# Altium footprint library Localisation_Node.PcbLib: 36 footprints (part 2 of 3)
Each footprint in its own frame and in the unit in brackets; x right, y up, seen from the top. Pads: shape width x height; smd on the part's side, far side on the other; paste and mask are expansions set on the pad; w line width, h text height; cw(c..) or ccw(c..) is an arc to the next point about the centre after c.
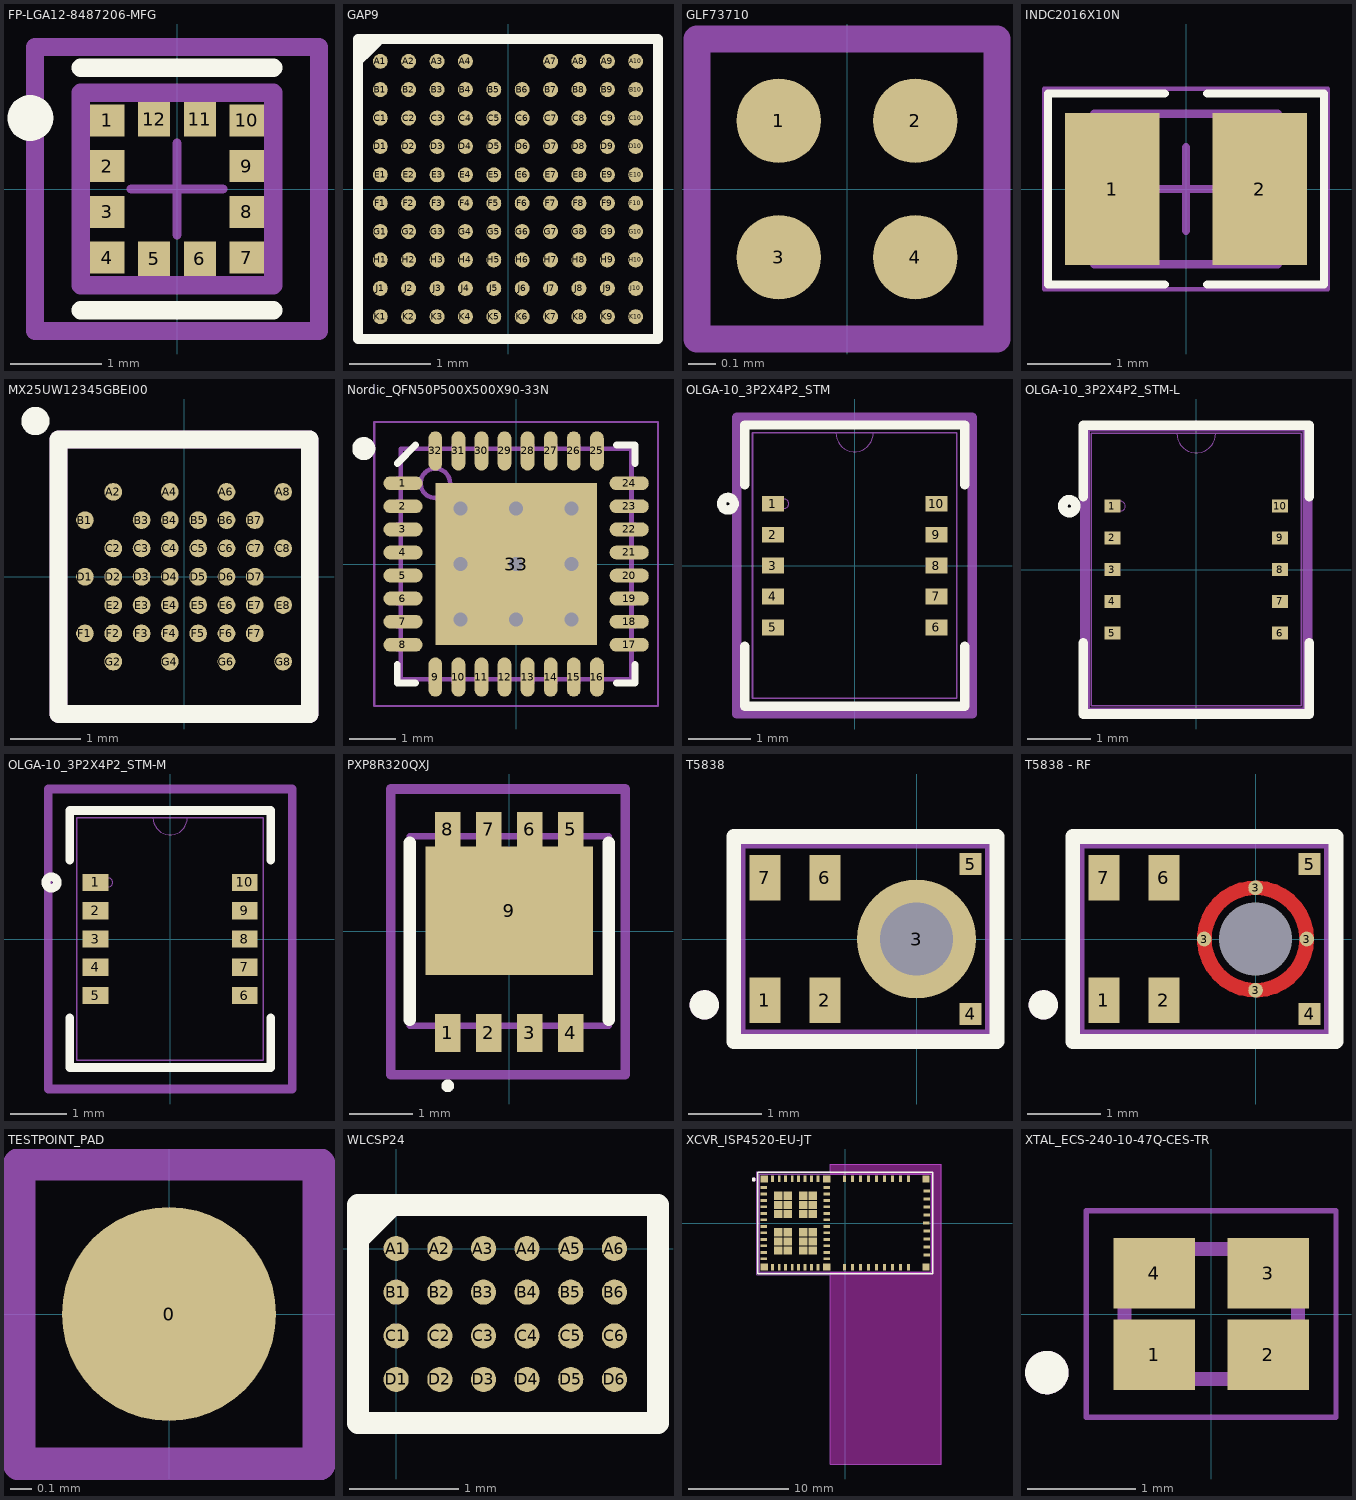
[diagram p1: the footprints below, top view; thin cyan lines are the x and y axes]

## FP-LGA12-8487206-MFG [mm]
pads (12):
  rect 0.375x0.35 smd paste-1000 mask+0: 1(-0.763,0.75) 2(-0.763,0.25) 3(-0.763,-0.25) 4(-0.763,-0.75) 7(0.763,-0.75) 8(0.763,-0.25) 9(0.763,0.25) 10(0.763,0.75)
  rect 0.35x0.375 smd paste-1000 mask+0: 5(-0.25,-0.763) 6(0.25,-0.763) 11(0.25,0.763) 12(-0.25,0.763)
Top Overlay:
  circle w0.25: c-1.6,0.775 r0.125
  lines w0.2: -1.05,-1.325 1.05,-1.325 ; -1.05,1.325 1.05,1.325
Top Paste:
  rectangle: -0.93,0.593 -0.595,0.907
  rectangle: -0.93,0.093 -0.595,0.406
  rectangle: -0.93,-0.406 -0.595,-0.093
  rectangle: -0.93,-0.907 -0.595,-0.593
  rectangle: 0.595,-0.907 0.93,-0.593
  rectangle: 0.595,-0.406 0.93,-0.093
  rectangle: 0.595,0.093 0.93,0.406
  rectangle: 0.595,0.593 0.93,0.907
  rectangle: -0.406,-0.93 -0.093,-0.595
  rectangle: 0.093,-0.93 0.406,-0.595
  rectangle: 0.093,0.595 0.406,0.93
  rectangle: -0.406,0.595 -0.093,0.93
Top 3D Body:
  lines w0.2: -1.05,-1.05 1.05,-1.05 1.05,1.05 -1.05,1.05 -1.05,-1.05
Top Courtyard:
  lines w0.2: -1.55,-1.55 1.55,-1.55 1.55,1.55 -1.55,1.55 -1.55,-1.55
Top Assembly:
  lines w0.2: -1.55,-1.55 1.55,-1.55 1.55,1.55 -1.55,1.55 -1.55,-1.55
Top Component Center:
  lines w0.1: -0.5,0 0.5,0 ; 0,-0.5 0,0.5
3D body "IC_STMicroelectronics_LSM303AHTR_eec.STEP": height 0.25, standoff 0, extent -1.55,-1.55 1.55,1.55

## GAP9 [mm]
pads (98):
  round 0.185 smd paste-0.005 mask+0: A1(-1.575,1.575) A2(-1.225,1.575) A3(-0.875,1.575) A4(-0.525,1.575) A7(0.525,1.575) A8(0.875,1.575) A9(1.225,1.575) A10(1.575,1.575) B1(-1.575,1.225) B2(-1.225,1.225) B3(-0.875,1.225) B4(-0.525,1.225) B5(-0.175,1.225) B6(0.175,1.225) B7(0.525,1.225) B8(0.875,1.225) B9(1.225,1.225) B10(1.575,1.225) C1(-1.575,0.875) C2(-1.225,0.875) C3(-0.875,0.875) C4(-0.525,0.875) C5(-0.175,0.875) C6(0.175,0.875) C7(0.525,0.875) C8(0.875,0.875) C9(1.225,0.875) C10(1.575,0.875) D1(-1.575,0.525) D2(-1.225,0.525) D3(-0.875,0.525) D4(-0.525,0.525) D5(-0.175,0.525) D6(0.175,0.525) D7(0.525,0.525) D8(0.875,0.525) D9(1.225,0.525) D10(1.575,0.525) E1(-1.575,0.175) E2(-1.225,0.175) E3(-0.875,0.175) E4(-0.525,0.175) E5(-0.175,0.175) E6(0.175,0.175) E7(0.525,0.175) E8(0.875,0.175) E9(1.225,0.175) E10(1.575,0.175) F1(-1.575,-0.175) F2(-1.225,-0.175) F3(-0.875,-0.175) F4(-0.525,-0.175) F5(-0.175,-0.175) F6(0.175,-0.175) F7(0.525,-0.175) F8(0.875,-0.175) F9(1.225,-0.175) F10(1.575,-0.175) G1(-1.575,-0.525) G2(-1.225,-0.525) G3(-0.875,-0.525) G4(-0.525,-0.525) G5(-0.175,-0.525) G6(0.175,-0.525) G7(0.525,-0.525) G8(0.875,-0.525) G9(1.225,-0.525) G10(1.575,-0.525) H1(-1.575,-0.875) H2(-1.225,-0.875) H3(-0.875,-0.875) H4(-0.525,-0.875) H5(-0.175,-0.875) H6(0.175,-0.875) H7(0.525,-0.875) H8(0.875,-0.875) H9(1.225,-0.875) H10(1.575,-0.875) J1(-1.575,-1.225) J2(-1.225,-1.225) J3(-0.875,-1.225) J4(-0.525,-1.225) J5(-0.175,-1.225) J6(0.175,-1.225) J7(0.525,-1.225) J8(0.875,-1.225) J9(1.225,-1.225) J10(1.575,-1.225) K1(-1.575,-1.575) K2(-1.225,-1.575) K3(-0.875,-1.575) K4(-0.525,-1.575) K5(-0.175,-1.575) K6(0.175,-1.575) K7(0.525,-1.575) K8(0.875,-1.575) K9(1.225,-1.575) K10(1.575,-1.575)
Top Overlay:
  lines w0.1: -1.837,1.608 -1.837,1.679 -1.716,1.8 -1.716,1.696 ; -1.835,1.577 -1.716,1.696 ; -1.597,1.814 -1.716,1.696
  lines w0.127: -1.85,-1.85 -1.85,1.85 1.85,1.85 1.85,-1.85 -1.85,-1.85
3D body: height 0.52, standoff 0.5, extent -1.651,1.397 -1.397,1.651
3D body: height 0.52, standoff 0, extent -1.85,-1.85 1.85,1.85

## GLF73710 [mm]
pads (4):
  round 0.31 smd mask+0.075: 1(-0.25,0.25) 2(0.25,0.25) 3(-0.25,-0.25) 4(0.25,-0.25)
Top Courtyard:
  lines w0.1: -0.55,-0.55 0.55,-0.55 0.55,0.55 -0.55,0.55 -0.55,-0.55
3D body: height 0.55, standoff 0, extent -0.487,-0.487 0.487,0.488

## INDC2016X10N [mm]
pads (2):
  rect 1.13x1.82 smd: 1(-0.885,0) 2(0.885,0)
Top Overlay:
  lines w0.1: -0.254,-1.143 -1.651,-1.143 -1.651,1.143 -0.254,1.143 ; 0.254,-1.143 1.651,-1.143 1.651,1.143 0.254,1.143
Top Courtyard:
  lines w0.05: -1.7,-1.2 1.7,-1.2 1.7,1.2 -1.7,1.2 -1.7,-1.2
  lines w0.1: -0.5,0 0.5,0 ; 0,-0.5 0,0.5
Mechanical 7:
  lines w0.1: -1.1,-0.9 1.1,-0.9 1.1,0.9 -1.1,0.9 -1.1,-0.9
  text ".Designator" at -1.93,-0.33 h0.31
3D body "INDC2016X10N.step": height 1, standoff 0, extent -1.1,-0.9 1.1,0.9

## MX25UW12345GBEI00 [mm] "128Mbit Flash"
pads (42):
  round 0.25 smd mask-0.02: A2(-1,1.2) A4(-0.2,1.2) A6(0.6,1.2) A8(1.4,1.2) B1(-1.4,0.8) B3(-0.6,0.8) B4(-0.2,0.8) B5(0.2,0.8) B6(0.6,0.8) B7(1,0.8) C2(-1,0.4) C3(-0.6,0.4) C4(-0.2,0.4) C5(0.2,0.4) C6(0.6,0.4) C7(1,0.4) C8(1.4,0.4) D1(-1.4,0) D2(-1,0) D3(-0.6,0) D4(-0.2,0) D5(0.2,0) D6(0.6,0) D7(1,0) E2(-1,-0.4) E3(-0.6,-0.4) E4(-0.2,-0.4) E5(0.2,-0.4) E6(0.6,-0.4) E7(1,-0.4) E8(1.4,-0.4) F1(-1.4,-0.8) F2(-1,-0.8) F3(-0.6,-0.8) F4(-0.2,-0.8) F5(0.2,-0.8) F6(0.6,-0.8) F7(1,-0.8) G2(-1,-1.2) G4(-0.2,-1.2) G6(0.6,-1.2) G8(1.4,-1.2)
Top Overlay:
  circle w0.2: c-2.1,2.2 r0.1
  lines w0.25: -1.775,-1.94 -1.775,1.94 1.775,1.94 1.775,-1.94 -1.775,-1.94
Mechanical 1:
  lines w0.25: -1.775,-1.94 -1.775,1.94 1.775,1.94 1.775,-1.94 -1.775,-1.94
3D body: height 0.52, standoff 0.5, extent -1.551,1.397 -1.297,1.651
3D body: height 0.52, standoff 0, extent -1.775,-1.94 1.775,1.94

## Nordic_QFN50P500X500X90-33N [mm]
pads (33):
  oval 0.85x0.3 smd mask+0.076: 1(-2.45,1.75) 2(-2.45,1.25) 3(-2.45,0.75) 4(-2.45,0.25) 5(-2.45,-0.25) 6(-2.45,-0.75) 7(-2.45,-1.25) 8(-2.45,-1.75) 17(2.45,-1.75) 18(2.45,-1.25) 19(2.45,-0.75) 20(2.45,-0.25) 21(2.45,0.25) 22(2.45,0.75) 23(2.45,1.25) 24(2.45,1.75)
  oval 0.3x0.85 smd mask+0.076: 9(-1.75,-2.45) 10(-1.25,-2.45) 11(-0.75,-2.45) 12(-0.25,-2.45) 13(0.25,-2.45) 14(0.75,-2.45) 15(1.25,-2.45) 16(1.75,-2.45) 25(1.75,2.45) 26(1.25,2.45) 27(0.75,2.45) 28(0.25,2.45) 29(-0.25,2.45) 30(-0.75,2.45) 31(-1.25,2.45) 32(-1.75,2.45)
  rect 3.5x3.5 smd: 33(0,0)
via 0,0 diameter 0.61 hole 0.305
via 0,1.2 diameter 0.61 hole 0.305
via -1.2,1.2 diameter 0.61 hole 0.305
via -1.2,0 diameter 0.61 hole 0.305
via -1.2,-1.2 diameter 0.61 hole 0.305
via 0,-1.2 diameter 0.61 hole 0.305
via 1.2,-1.2 diameter 0.61 hole 0.305
via 1.2,0 diameter 0.61 hole 0.305
via 1.2,1.2 diameter 0.61 hole 0.305
Top Overlay:
  circle w0.25: c-3.3,2.5 r0.125
  lines w0.15: -2.575,-2.175 -2.575,-2.575 -2.175,-2.575 ; -2.575,2.175 -2.175,2.575 ; 2.175,-2.575 2.575,-2.575 2.575,-2.175 ; 2.175,2.575 2.575,2.575 2.575,2.175
Top Courtyard:
  lines w0.05: -3.075,-3.075 3.075,-3.075 3.075,3.075 -3.075,3.075 -3.075,-3.075
  lines w0.1: -0.5,0 0.5,0 ; 0,-0.5 0,0.5
Mechanical 7:
  circle w0.1: c-1.75,1.75 r0.32
  lines w0.1: -2.5,-1.845 -2.571,-1.845 cw(c-2.571,-1.75) -2.571,-1.655 -2.5,-1.655 ; -2.5,-1.345 -2.571,-1.345 cw(c-2.571,-1.25) -2.571,-1.155 -2.5,-1.155 ; -2.5,-0.845 -2.571,-0.845 cw(c-2.571,-0.75) -2.571,-0.655 -2.5,-0.655 ; -2.5,-0.345 -2.571,-0.345 cw(c-2.571,-0.25) -2.571,-0.155 -2.5,-0.155 ; -2.5,0.155 -2.571,0.155 cw(c-2.571,0.25) -2.571,0.345 -2.5,0.345 ; -2.5,0.655 -2.571,0.655 cw(c-2.571,0.75) -2.571,0.845 -2.5,0.845 ; -2.5,1.155 -2.571,1.155 cw(c-2.571,1.25) -2.571,1.345 -2.5,1.345 ; -2.5,1.655 -2.571,1.655 cw(c-2.571,1.75) -2.571,1.845 -2.5,1.845 ; -1.845,-2.5 -1.845,-2.571 ccw(c-1.75,-2.571) -1.655,-2.571 -1.655,-2.5 ; -1.845,2.5 -1.845,2.571 cw(c-1.75,2.571) -1.655,2.571 -1.655,2.5 ; -1.345,-2.5 -1.345,-2.571 ccw(c-1.25,-2.571) -1.155,-2.571 -1.155,-2.5 ; -1.345,2.5 -1.345,2.571 cw(c-1.25,2.571) -1.155,2.571 -1.155,2.5 ; -0.845,-2.5 -0.845,-2.571 ccw(c-0.75,-2.571) -0.655,-2.571 -0.655,-2.5 ; -0.845,2.5 -0.845,2.571 cw(c-0.75,2.571) -0.655,2.571 -0.655,2.5 ; -0.345,-2.5 -0.345,-2.571 ccw(c-0.25,-2.571) -0.155,-2.571 -0.155,-2.5 ; -0.345,2.5 -0.345,2.571 cw(c-0.25,2.571) -0.155,2.571 -0.155,2.5 ; 0.155,-2.5 0.155,-2.571 ccw(c0.25,-2.571) 0.345,-2.571 0.345,-2.5 ; 0.155,2.5 0.155,2.571 cw(c0.25,2.571) 0.345,2.571 0.345,2.5 ; 0.655,-2.5 0.655,-2.571 ccw(c0.75,-2.571) 0.845,-2.571 0.845,-2.5 ; 0.655,2.5 0.655,2.571 cw(c0.75,2.571) 0.845,2.571 0.845,2.5 ; 1.155,-2.5 1.155,-2.571 ccw(c1.25,-2.571) 1.345,-2.571 1.345,-2.5 ; 1.155,2.5 1.155,2.571 cw(c1.25,2.571) 1.345,2.571 1.345,2.5 ; 1.655,-2.5 1.655,-2.571 ccw(c1.75,-2.571) 1.845,-2.571 1.845,-2.5 ; 1.655,2.5 1.655,2.571 cw(c1.75,2.571) 1.845,2.571 1.845,2.5 ; 2.5,-1.845 2.571,-1.845 ccw(c2.571,-1.75) 2.571,-1.655 2.5,-1.655 ; 2.5,-1.345 2.571,-1.345 ccw(c2.571,-1.25) 2.571,-1.155 2.5,-1.155 ; 2.5,-0.845 2.571,-0.845 ccw(c2.571,-0.75) 2.571,-0.655 2.5,-0.655 ; 2.5,-0.345 2.571,-0.345 ccw(c2.571,-0.25) 2.571,-0.155 2.5,-0.155 ; 2.5,0.155 2.571,0.155 ccw(c2.571,0.25) 2.571,0.345 2.5,0.345 ; 2.5,0.655 2.571,0.655 ccw(c2.571,0.75) 2.571,0.845 2.5,0.845 ; 2.5,1.155 2.571,1.155 ccw(c2.571,1.25) 2.571,1.345 2.5,1.345 ; 2.5,1.655 2.571,1.655 ccw(c2.571,1.75) 2.571,1.845 2.5,1.845 ; -2.5,-2.5 -2.5,2.5 2.5,2.5 2.5,-2.5 -2.5,-2.5
  text ".Designator" at -1.525,-0.102 h0.31
3D body "QFN50P500X500X90_HS-33N.step": height 0.9, standoff 0, extent -2.501,-2.501 2.501,2.501

## OLGA-10_3P2X4P2_STM [mil]
pads (10):
  rect 14x10 smd paste+0 mask+0: 1(-52,39.37) 2(-52,19.68) 3(-52,0) 4(-52,-19.68) 5(-52,-39.37) 6(52,-39.37) 7(52,-19.68) 8(52,0) 9(52,19.68) 10(52,39.37)
Top Overlay:
  circle w6: c-80.69,39.37 r4
  lines w6: -70,-51.48 -70,-89.5 70,-89.5 70,-51.48 ; -70,51.48 -70,89.5 70,89.5 70,51.48
Mechanical 13:
  circle w0: c-45,39.37 r3
  lines w0: -12,84.5 ccw(c0,84.5) 12,84.5
  lines w1: -65,-84.5 -65,84.5 65,84.5 65,-84.5 -65,-84.5
Mechanical 15:
  lines w6: -75,-94.5 75,-94.5 75,-54.37 75,54.37 75,94.5 -75,94.5 -75,54.37 -75,-54.37 -75,-94.5
3D body "OLGA-10_3P2X4P2_STM.step": height 57.09, standoff 0, extent -65,-84.49 65,84.49

## OLGA-10_3P2X4P2_STM-L [mil]
pads (10):
  rect 10.06x8.03 smd paste+0 mask+0: 1(-52,39.37) 2(-52,19.68) 3(-52,0) 4(-52,-19.68) 5(-52,-39.37) 6(52,-39.37) 7(52,-19.68) 8(52,0) 9(52,19.68) 10(52,39.37)
Top Overlay:
  circle w6: c-78.72,39.37 r4
  lines w6: -70,-45.24 -70,-89.5 70,-89.5 70,-45.24 ; -70,45.24 -70,89.5 70,89.5 70,45.24
Mechanical 13:
  circle w0: c-46.97,39.37 r3
  lines w0: -12,84.5 ccw(c0,84.5) 12,84.5
  lines w1: -65,-84.5 65,-84.5 65,84.5 -65,84.5 -65,-84.5
Mechanical 15:
  lines w6: -69,-88.5 -69,-47.39 -69,47.39 -69,88.5 69,88.5 69,47.39 69,-47.39 69,-88.5 -69,-88.5
3D body "OLGA-10_3P2X4P2_STM.step": height 57.09, standoff 0, extent -65,-84.49 65,84.49

## OLGA-10_3P2X4P2_STM-M [mil]
pads (10):
  rect 17.94x11.97 smd paste+0 mask+0: 1(-52,39.37) 2(-52,19.68) 3(-52,0) 4(-52,-19.68) 5(-52,-39.37) 6(52,-39.37) 7(52,-19.68) 8(52,0) 9(52,19.68) 10(52,39.37)
Top Overlay:
  circle w6: c-82.65,39.37 r4
  lines w6: -70,-54.84 -70,-89.5 70,-89.5 70,-54.84 ; -70,54.84 -70,89.5 70,89.5 70,54.84
Mechanical 13:
  circle w0: c-43.03,39.37 r3
  lines w0: -12,84.5 ccw(c0,84.5) 12,84.5
  lines w1: -65,-84.5 65,-84.5 65,84.5 -65,84.5 -65,-84.5
Mechanical 15:
  lines w6: -85,-104.5 -85,-65.35 -85,65.35 -85,104.5 85,104.5 85,65.35 85,-65.35 85,-104.5 -85,-104.5
3D body "OLGA-10_3P2X4P2_STM.step": height 57.09, standoff 0, extent -65,-84.49 65,84.49

## PXP8R320QXJ [mm]
pads (9):
  rect 0.4x0.6 smd: 1(-0.975,-1.613) 2(-0.325,-1.613) 3(0.325,-1.613) 4(0.975,-1.613)
  rect 0.4x0.55 smd: 5(0.975,1.613) 6(0.325,1.613) 7(-0.325,1.613) 8(-0.975,1.613)
  rect 2.65x2.03 smd: 9(0,0.323)
Top Overlay:
  lines w0.1: -0.975,-2.5 cw(c-0.975,-2.45) -0.975,-2.4 cw(c-0.975,-2.45) -0.975,-2.5
  lines w0.2: -1.575,-1.4 -1.575,1.4 ; 1.575,-1.4 1.575,1.4
Top Courtyard:
  lines w0.154: -1.875,-2.275 -1.875,2.25
Mechanical 15:
  lines w0.1: -1.575,-1.5 1.575,-1.5 1.575,1.5 -1.575,1.5 -1.575,-1.5
  lines w0.152: -1.875,-2.275 1.834,-2.275 1.834,-1.66 1.834,1.66 1.834,2.25 -1.875,2.25
3D body "PXP8R3-20QXJ.stp": height 0.79, standoff -0.03, extent -1.64,-1.8 1.64,1.5

## T5838 [mm]
pads (7):
  rect 0.422x0.625 smd: 1(-2.072,-0.837) 2(-1.252,-0.837) 6(-1.252,0.837) 7(-2.072,0.837)
  round 1.625 hole 1: 3(0,0)
  rect 0.3x0.3 smd: 4(0.74,-1.025) 5(0.74,1.025)
Top Overlay:
  circle w0.2: c-2.9,-0.9 r0.1
  lines w0.2: -2.5,-1.4 1.1,-1.4 1.1,1.4 -2.5,1.4 -2.5,-1.4
Top Paste:
  region: -0.511,0.056 -0.496,0.136 -0.429,0.283 -0.319,0.403 -0.178,0.483 -0.1,0.505 -0.1,0.756 -0.23,0.738 -0.462,0.617 -0.641,0.426 -0.747,0.186 -0.757,0.056
  region: -0.056,-0.511 -0.136,-0.496 -0.283,-0.429 -0.403,-0.319 -0.483,-0.178 -0.505,-0.1 -0.756,-0.1 -0.738,-0.23 -0.617,-0.462 -0.426,-0.641 -0.186,-0.747 -0.056,-0.757
  region: 0.511,-0.056 0.496,-0.136 0.429,-0.283 0.319,-0.403 0.178,-0.483 0.1,-0.505 0.1,-0.756 0.23,-0.738 0.462,-0.617 0.641,-0.426 0.747,-0.186 0.757,-0.056
  region: 0.056,0.511 0.136,0.496 0.283,0.429 0.403,0.319 0.483,0.178 0.505,0.1 0.756,0.1 0.738,0.23 0.617,0.462 0.426,0.641 0.186,0.747 0.056,0.757
Mechanical 13:
  circle w0.2: c-2.9,-0.9 r0.1
  lines w0.127: -2.4,-1.3 1,-1.3 1,1.3 -2.4,1.3 -2.4,-1.3
Mechanical 15:
  lines w0.05: -2.4,-1.3 1,-1.3 1,1.3 -2.4,1.3 -2.4,-1.3
3D body "T5838.stp": height 0.97, standoff 0, extent -2.46,-1.325 1.04,1.325

## T5838 - RF [mm]
pads (11):
  rect 0.422x0.625 smd: 1(-2.072,-0.837) 2(-1.252,-0.837) 6(-1.252,0.837) 7(-2.072,0.837)
  round 0.2 smd: 3(-0.7,0) 3(0,-0.7) 3(0,0.7) 3(0.7,0)
  rect 0.3x0.3 smd: 4(0.74,-1.025) 5(0.74,1.025)
  round 0 hole 1 unplated: ""(0,0)
Top Layer:
  circle w0.2: c0,0 r0.7
Top Overlay:
  circle w0.2: c-2.9,-0.9 r0.1
  lines w0.2: -2.5,-1.4 1.1,-1.4 1.1,1.4 -2.5,1.4 -2.5,-1.4
Top Paste:
  region: 0.056,0.597 0.152,0.578 0.331,0.497 0.475,0.365 0.572,0.194 0.599,0.1 0.802,0.1 0.782,0.238 0.653,0.485 0.45,0.676 0.195,0.789 0.056,0.8
  region: 0.597,-0.056 0.578,-0.152 0.497,-0.331 0.365,-0.475 0.194,-0.572 0.1,-0.599 0.1,-0.802 0.238,-0.782 0.485,-0.653 0.676,-0.45 0.789,-0.195 0.8,-0.056
  region: -0.056,-0.597 -0.152,-0.578 -0.331,-0.497 -0.475,-0.365 -0.572,-0.194 -0.599,-0.1 -0.802,-0.1 -0.782,-0.238 -0.653,-0.485 -0.45,-0.676 -0.195,-0.789 -0.056,-0.8
  region: -0.597,0.056 -0.578,0.152 -0.497,0.331 -0.365,0.475 -0.194,0.572 -0.1,0.599 -0.1,0.802 -0.238,0.782 -0.485,0.653 -0.676,0.45 -0.789,0.195 -0.8,0.056
Top Solder:
  circle w0.4: c0,0 r0.7
Mechanical 13:
  circle w0.2: c-2.9,-0.9 r0.1
  lines w0.127: -2.4,-1.3 1,-1.3 1,1.3 -2.4,1.3 -2.4,-1.3
Mechanical 15:
  lines w0.05: -2.4,-1.3 1,-1.3 1,1.3 -2.4,1.3 -2.4,-1.3
3D body "T5838.stp": height 0.97, standoff 0, extent -2.46,-1.325 1.04,1.325

## TESTPOINT_PAD [mm] "1mm diameter circular pad"
pads (1):
  round 1 smd: 0(0,0)
Top Courtyard:
  lines w0.154: -0.7,-0.7 0.7,-0.7 0.7,0.7 -0.7,0.7 -0.7,0 -0.7,-0.7

## WLCSP24 [mm]
pads (24):
  round 0.23 smd mask-0.02: A1(0,0) A2(0.4,0) A3(0.8,0) A4(1.2,0) A5(1.6,0) A6(2,0) B1(0,-0.4) B2(0.4,-0.4) B3(0.8,-0.4) B4(1.2,-0.4) B5(1.6,-0.4) B6(2,-0.4) C1(0,-0.8) C2(0.4,-0.8) C3(0.8,-0.8) C4(1.2,-0.8) C5(1.6,-0.8) C6(2,-0.8) D1(0,-1.2) D2(0.4,-1.2) D3(0.8,-1.2) D4(1.2,-1.2) D5(1.6,-1.2) D6(2,-1.2)
Top Overlay:
  lines w0.2: -0.34,0.11 -0.324,0.11 -0.037,0.397 ; 2.4,-1.6 -0.35,-1.6 -0.35,0.4 2.4,0.4 2.4,-1.57
3D body: height 0.52, standoff 0.5, extent -0.151,-0.103 0.103,0.151
3D body: height 0.51, standoff 0.21, extent -0.28,-1.52 2.36,0.32

## XCVR_ISP4520-EU-JT [mm]
pads (97):
  rect 0.7x0.7 smd: 1(-8.1,4.4) 14(-8.1,-4.4) 23(-1.85,-4.4) 36(-1.85,4.4) 54(8.1,-4.4) 64(8.1,4.4)
  rect 0.65x0.3 smd: 2(-8.125,3.575) 3(-8.125,2.925) 4(-8.125,2.275) 5(-8.125,1.625) 6(-8.125,0.975) 7(-8.125,0.325) 8(-8.125,-0.325) 9(-8.125,-0.975) 10(-8.125,-1.625) 11(-8.125,-2.275) 12(-8.125,-2.925) 13(-8.125,-3.575) 24(-1.825,-3.575) 25(-1.825,-2.925) 26(-1.825,-2.275) 27(-1.825,-1.625) 28(-1.825,-0.975) 29(-1.825,-0.325) 30(-1.825,0.325) 31(-1.825,0.975) 32(-1.825,1.625) 33(-1.825,2.275) 34(-1.825,2.925) 35(-1.825,3.575) 55(8.13,-3.2) 56(8.13,-2.4) 57(8.13,-1.6) 58(8.13,-0.8) 59(8.125,0) 60(8.13,0.8) 61(8.13,1.6) 62(8.13,2.4) 63(8.13,3.2)
  rect 0.3x0.65 smd: 15(-7.25,-4.425) 16(-6.6,-4.425) 17(-5.95,-4.425) 18(-5.3,-4.425) 19(-4.65,-4.425) 20(-4,-4.425) 21(-3.35,-4.425) 22(-2.7,-4.425) 37(-2.7,4.425) 38(-3.35,4.425) 39(-4,4.425) 40(-4.65,4.425) 41(-5.3,4.425) 42(-5.95,4.425) 43(-6.6,4.425) 44(-7.25,4.425) 45(-0.075,-4.425) 46(0.725,-4.425) 47(1.525,-4.425) 48(2.325,-4.425) 49(3.125,-4.425) 50(3.925,-4.425) 51(4.725,-4.425) 52(5.525,-4.425) 53(6.325,-4.425) 65(6.325,4.425) 66(5.525,4.425) 67(4.725,4.425) 68(3.925,4.425) 69(3.125,4.425) 70(2.325,4.425) 71(1.525,4.425) 72(0.725,4.425) 73(-0.075,4.425)
  rect 0.85x0.8 smd: 74(-6.72,2.725) 75(-5.77,2.725) 76(-4.175,2.725) 77(-3.225,2.725) 78(-6.72,1.825) 79(-5.77,1.825) 80(-4.175,1.825) 81(-3.225,1.825) 82(-6.72,0.925) 83(-5.77,0.925) 84(-4.175,0.925) 85(-3.225,0.925) 86(-6.72,-0.925) 87(-5.77,-0.925) 88(-4.175,-0.925) 89(-3.225,-0.925) 90(-6.72,-1.825) 91(-5.77,-1.825) 92(-4.175,-1.825) 93(-3.225,-1.825) 94(-6.72,-2.725) 95(-5.77,-2.725) 96(-4.175,-2.725) 97(-3.225,-2.725)
Top Overlay:
  circle w0.2: c-9.15,4.35 r0.1
  lines w0.127: -8.77,-5.07 8.77,-5.07 8.77,5.07 -8.77,5.07 -8.77,-5.07
Keep-Out Layer:
  region: 9.6,-24.1 -1.5,-24.1 -1.5,-4.9 8.6,-4.9 8.6,4.9 -1.5,4.9 -1.5,5.9 9.6,5.9
  region: 9.6,-24.1 -1.5,-24.1 -1.5,-4.9 8.6,-4.9 8.6,4.9 -1.5,4.9 -1.5,5.9 9.6,5.9
  region: 9.6,-24.1 -1.5,-24.1 -1.5,-4.9 8.6,-4.9 8.6,4.9 -1.5,4.9 -1.5,5.9 9.6,5.9
Mechanical 13:
  circle w0.2: c-9.15,4.35 r0.1
  lines w0.05: -8.85,-5.15 -8.85,5.15 -1.5,5.15 -1.5,5.9 9.6,5.9 9.6,-24.1 -1.5,-24.1 -1.5,-5.15 -8.85,-5.15
  lines w0.127: -8.6,-4.9 8.6,-4.9 8.6,4.9 -8.6,4.9 -8.6,-4.9
Mechanical 15:
  lines w0.05: -8.85,-5.15 -8.85,5.15 -1.5,5.15 -1.5,5.9 9.6,5.9 9.6,-24.1 -1.5,-24.1 -1.5,-5.15 -8.85,-5.15
3D body "ISP4520EUJT--3DModel-STEP-1.STEP": height 1.71, standoff 0.01, extent -8.6,-4.9 8.6,4.9

## XTAL_ECS-240-10-47Q-CES-TR [mm]
pads (4):
  rect 0.75x0.65 smd: 1(-0.525,-0.375) 2(0.525,-0.375) 3(0.525,0.375) 4(-0.525,0.375)
Top Overlay:
  circle w0.2: c-1.515,-0.54 r0.1
Mechanical 13:
  circle w0.2: c-1.515,-0.54 r0.1
  lines w0.127: -0.8,-0.6 -0.8,0.6 0.8,0.6 0.8,-0.6 -0.8,-0.6
Mechanical 15:
  lines w0.05: -1.15,-0.95 -1.15,0.95 1.15,0.95 1.15,-0.95 -1.15,-0.95
3D body "ECS-240-10-47Q-CES-TR--3DModel-STEP-269445.STEP": height 0.41, standoff 0.01, extent -0.8,-0.6 0.8,0.6